# Altium footprint library PTD9042015Kc104.PcbLib: 1 footprints
Each footprint in its own frame and in the unit in brackets; x right, y up, seen from the top. Pads: shape width x height; smd on the part's side, far side on the other; paste and mask are expansions set on the pad; w line width, h text height; cw(c..) or ccw(c..) is an arc to the next point about the centre after c.
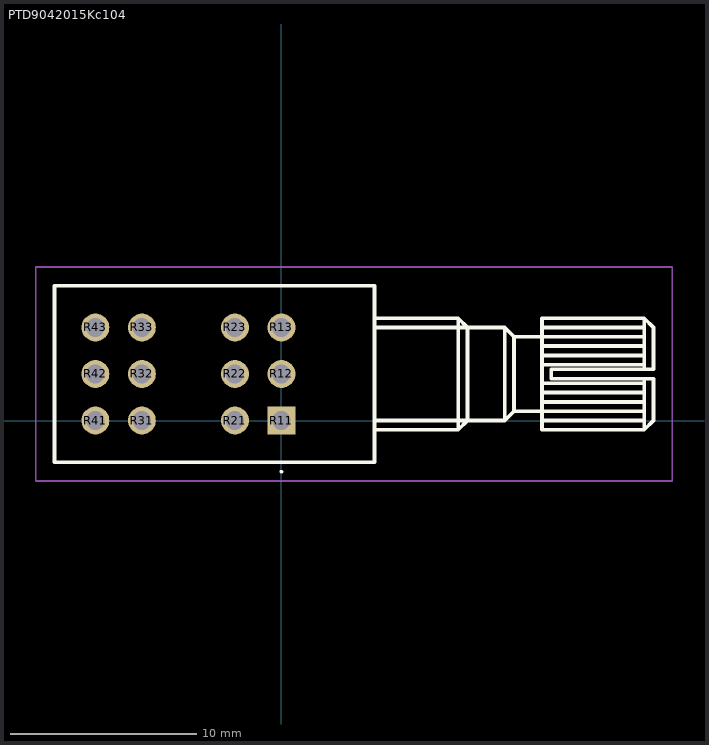
[diagram p0: the footprint, top view; thin cyan lines are the x and y axes]

## PTD9042015Kc104 [mm]
pads (12):
  rect 1.5x1.5 hole 1: R11(0,0)
  round 1.5 hole 1: R12(0,2.5) R13(0,5) R21(-2.5,0) R22(-2.5,2.5) R23(-2.5,5) R31(-7.5,0) R32(-7.5,2.5) R33(-7.5,5) R41(-10,0) R42(-10,2.5) R43(-10,5)
Top Overlay:
  lines w0.1: 0,-2.8 cw(c0,-2.75) 0,-2.7 ; 0,-2.8 0,-2.8 ; 0,-2.8 ccw(c0,-2.75) 0,-2.7 ; 0,-2.7 0,-2.7
  lines w0.2: 5,-0.5 9.5,-0.5 ; 5,0 12,0 ; 5,5 12,5 ; 5,5.5 9.5,5.5 ; 14,0 19.5,0 ; 14,1 19.5,1 ; 14,1.5 19.5,1.5 ; 14,2 19.5,2 ; 14,3 19.5,3 ; 14,3.5 19.5,3.5 ; 14,4 19.5,4 ; 14,5 19.5,5 ; 19.5,0.5 12.5,0.5 ; 19.5,2.25 19.5,-0.5 ; 19.5,2.75 19.5,5.5 ; 19.5,4.5 12.5,4.5 ; 9.5,-0.5 10,0 10,5 9.5,5.5 ; 9.5,-0.5 9.5,5.5 ; 12,0 12.5,0.5 ; 12,0 12,5 ; 12,5 12.5,4.5 ; 12.5,0.5 12.5,4.5 ; 19.5,-0.5 20,0 20,2.25 14.5,2.25 14.5,2.75 20,2.75 20,5 19.5,5.5 ; 19.5,-0.5 14,-0.5 14,2.5 14,5.5 19.5,5.5 ; -12.2,-2.25 5,-2.25 5,7.25 -12.2,7.25 -12.2,-2.25
Mechanical 15:
  lines w0.1: 5,-0.5 9.5,-0.5 ; 5,0 12,0 ; 5,5 12,5 ; 5,5.5 9.5,5.5 ; 14,0 19.5,0 ; 14,1 19.5,1 ; 14,1.5 19.5,1.5 ; 14,2 19.5,2 ; 14,3 19.5,3 ; 14,3.5 19.5,3.5 ; 14,4 19.5,4 ; 14,5 19.5,5 ; 19.5,0.5 14,0.5 12.5,0.5 ; 19.5,2.25 19.5,-0.5 ; 19.5,2.75 19.5,5.5 ; 19.5,4.5 14,4.5 12.5,4.5 ; 9.5,-0.5 10,0 10,5 9.5,5.5 ; 9.5,-0.5 9.5,5.5 ; 12,0 12.5,0.5 ; 12,0 12,5 ; 12,5 12.5,4.5 ; 12.5,0.5 12.5,4.5 ; 19.5,-0.5 20,0 20,2.25 14.5,2.25 14.5,2.75 20,2.75 20,5 19.5,5.5 ; 19.5,-0.5 14,-0.5 14,2.5 14,5.5 19.5,5.5 ; -12.2,-2.25 5,-2.25 5,7.25 -12.2,7.25 -12.2,-2.25
Mechanical 20:
  lines w0.1: -13.2,-3.25 21,-3.25 21,8.25 -13.2,8.25 -13.2,-3.25